# EAGLE library part HDR-1X20-2.0 (library rtd2660_board)
1 x 20 pin header 2.0 mm, LVDS panel connector
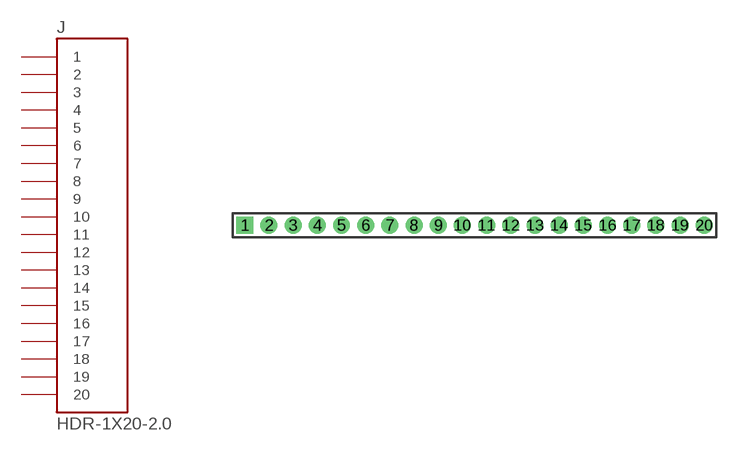
[diagram p3: symbol with the pads of HDR1X20-2.0; footprint HDR1X20-2.0]

Designator prefix J

## HDR-1X20-2.0  [HDR1X20-2.0]
1  1  pas
2  2  pas
3  3  pas
4  4  pas
5  5  pas
6  6  pas
7  7  pas
8  8  pas
9  9  pas
10  10  pas
11  11  pas
12  12  pas
13  13  pas
14  14  pas
15  15  pas
16  16  pas
17  17  pas
18  18  pas
19  19  pas
20  20  pas

## Footprint HDR1X20-2.0 (pad centres in mm)
1 x 20 pin header, 2.0 mm pitch (LVDS panel cable)
drill 0.8 pad 1.4 square: 1 0,0
drill 0.8 pad 1.4 round: 2 2,0; 3 4,0; 4 6,0; 5 8,0; 6 10,0; 7 12,0; 8 14,0; 9 16,0; 10 18,0; 11 20,0; 12 22,0; 13 24,0; 14 26,0; 15 28,0; 16 30,0; 17 32,0; 18 34,0; 19 36,0; 20 38,0